# Altium footprint library Aquarium_ATO_V1_0.PcbLib: 21 footprints (part 2 of 2)
Each footprint in its own frame and in the unit in brackets; x right, y up, seen from the top. Pads: shape width x height; smd on the part's side, far side on the other; paste and mask are expansions set on the pad; w line width, h text height; cw(c..) or ccw(c..) is an arc to the next point about the centre after c.
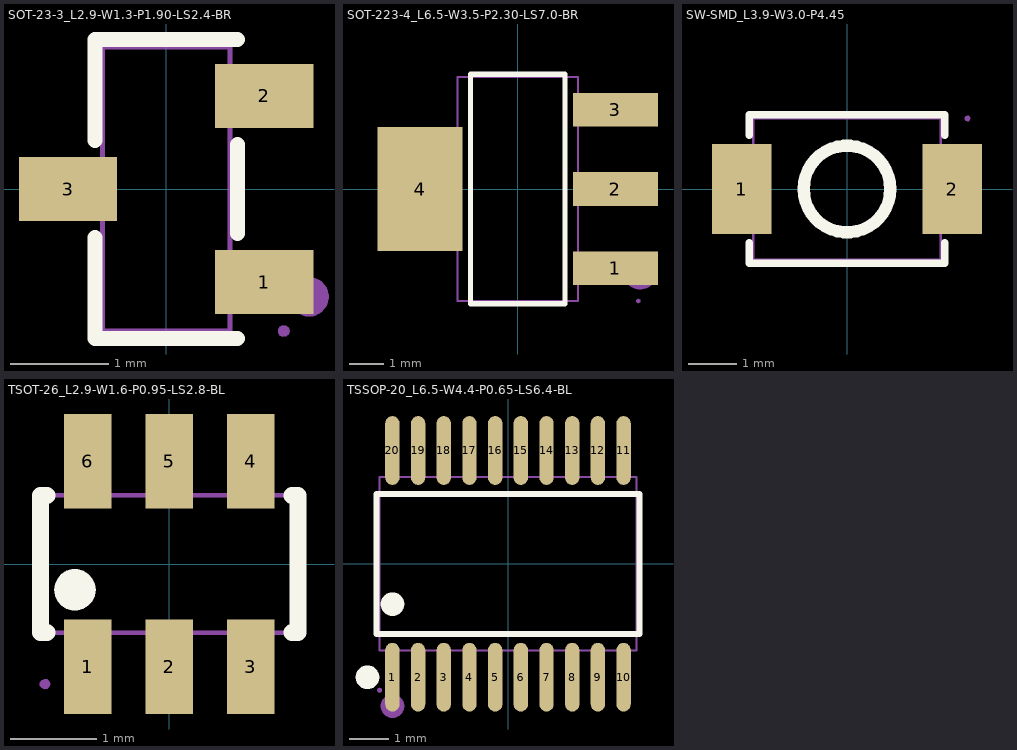
[diagram p1: the footprints below, top view; thin cyan lines are the x and y axes]

## SOT-23-3_L2.9-W1.3-P1.90-LS2.4-BR [mil]
pads (3):
  rect 39.4x25.6 smd: 1(39.4,-37.4) 2(39.4,37.4) 3(-39.4,0)
Top Overlay:
  lines w6: -28.6,-19.5 -28.6,-60.1 28.6,-60.1 ; -28.6,19.5 -28.6,60.1 28.6,60.1 ; 28.6,-17.9 28.6,17.9
Mechanical 6:
  lines w7.9: 53.5,-43.3 53.9,-41.6 55,-40.2 56.6,-39.5 58.4,-39.5 59.9,-40.2 61,-41.6 61.4,-43.3 61,-45 59.9,-46.4 58.4,-47.2 56.6,-47.2 55,-46.4 53.9,-45 53.5,-43.3
Mechanical 7:
  lines w2: -25.6,-57.1 25.6,-57.1 25.6,57.1 -25.6,57.1 -25.6,-57.1
Mechanical 8:
  region: 49.6,-57.1 49.2,-58.4 48.2,-59.2 46.9,-59.4 45.7,-58.9 45,-57.8 45,-56.4 45.7,-55.3 46.9,-54.8 48.2,-54.9 49.2,-55.8
Mechanical 9:
  region: -47.2,-8.5 -47.2,8.5 -35.4,8.5 -35.4,-8.5
  region: 35.4,-45.9 35.4,-28.9 47.2,-28.9 47.2,-45.9
  region: 35.4,28.9 35.4,45.9 47.2,45.9 47.2,28.9
Mechanical 10:
  region: -35.8,-8.5 -35.8,8.5 -25.2,8.5 -25.2,-8.5
  region: 25.2,-45.9 25.2,-28.9 35.8,-28.9 35.8,-45.9
  region: 25.2,28.9 25.2,45.9 35.8,45.9 35.8,28.9

## SOT-223-4_L6.5-W3.5-P2.30-LS7.0-BR [mil]
pads (4):
  rect 97.2x38.6 smd: 1(111.6,-90.6) 2(111.6,0) 3(111.6,90.6)
  rect 97.2x141.7 smd: 4(-111.6,0)
Top Overlay:
  lines w6: -54,-131 54,-131 54,131 -54,131 -54,-131
Mechanical 6:
  lines w19.7: 130.2,-96.3 130.2,-93.7 131,-91.1 132.4,-88.8 134.3,-87 136.7,-85.7 139.3,-85.2 142,-85.4 144.5,-86.3 146.7,-87.8 148.4,-89.9 149.5,-92.3 149.8,-95 149.5,-97.7 148.4,-100.1 146.7,-102.2 144.5,-103.7 142,-104.6 139.3,-104.8 136.7,-104.3 134.3,-103 132.4,-101.2 131,-98.9 130.2,-96.3
Mechanical 7:
  lines w2: -68.9,-128 68.9,-128 68.9,128 -68.9,128 -68.9,-128
Mechanical 8:
  region: 140.2,-127.9 139.8,-129.2 138.8,-130.1 137.5,-130.3 136.3,-129.7 135.5,-128.6 135.5,-127.3 136.3,-126.2 137.5,-125.6 138.8,-125.8 139.8,-126.7
Mechanical 9:
  region: -100.4,-59.1 -100.4,59.1 -137.8,59.1 -137.8,-59.1
  region: 100.4,76.8 100.4,104.3 137.8,104.3 137.8,76.8
  region: 100.4,-13.8 100.4,13.8 137.8,13.8 137.8,-13.8
  region: 100.4,-104.3 100.4,-76.8 137.8,-76.8 137.8,-104.3
Mechanical 10:
  region: -100.8,-59.1 -100.8,59.1 -68.5,59.1 -68.5,-59.1
  region: 68.5,76.8 68.5,104.3 100.8,104.3 100.8,76.8
  region: 68.5,-13.8 68.5,13.8 100.8,13.8 100.8,-13.8
  region: 68.5,-104.3 68.5,-76.8 100.8,-76.8 100.8,-104.3

## SW-SMD_L3.9-W3.0-P4.45 [mil]
pads (2):
  rect 48.4x73.2 smd: 1(-86,0) 2(86,0)
Top Overlay:
  lines w6: -79.8,-43.7 -79.8,-60.7 79.8,-60.7 79.8,-43.7 ; -79.8,43.7 -79.8,60.7 79.8,60.7 79.8,43.7
  lines w10: -35.4,0 -35,5.3 -33.9,10.4 -31.9,15.4 -29.3,20 -26,24.1 -22.1,27.7 -17.7,30.7 -12.9,33 -7.9,34.5 -2.6,35.3 2.6,35.3 7.9,34.5 12.9,33 17.7,30.7 22.1,27.7 26,24.1 29.3,20 31.9,15.4 33.9,10.4 35,5.3 35.4,0 35,-5.3 33.9,-10.4 31.9,-15.4 29.3,-20 26,-24.1 22.1,-27.7 17.7,-30.7 12.9,-33 7.9,-34.5 2.6,-35.3 -2.6,-35.3 -7.9,-34.5 -12.9,-33 -17.7,-30.7 -22.1,-27.7 -26,-24.1 -29.3,-20 -31.9,-15.4 -33.9,-10.4 -35,-5.3 -35.4,0
Mechanical 7:
  lines w2: -76.8,-57.7 -76.8,57.7 76.8,57.7 76.8,-57.7 -76.8,-57.7
Mechanical 8:
  region: 100.8,57.7 100.4,56.4 99.4,55.5 98.1,55.3 96.9,55.9 96.2,57 96.2,58.3 96.9,59.5 98.1,60 99.4,59.8 100.4,59
Mechanical 9:
  region: -98.4,25.6 -98.4,-25.6 -63,-25.6 -63,25.6
  region: 98.4,25.6 98.4,-25.6 63,-25.6 63,25.6

## TSOT-26_L2.9-W1.6-P0.95-LS2.8-BL [mil]
pads (6):
  rect 21.7x43.3 smd paste+0 mask+2: 1(-37.4,-47.2) 2(0,-47.2) 3(37.4,-47.2) 4(37.4,47.2) 5(0,47.2) 6(-37.4,47.2)
Top Overlay:
  region: -52.8,-11.8 -52.4,-9.1 -51.3,-6.7 -49.5,-4.6 -47.3,-3.2 -44.7,-2.4 -42,-2.4 -39.4,-3.2 -37.1,-4.6 -35.3,-6.7 -34.2,-9.1 -33.8,-11.8 -34.2,-14.5 -35.3,-17 -37.1,-19 -39.4,-20.5 -42,-21.2 -44.7,-21.2 -47.3,-20.5 -49.5,-19 -51.3,-17 -52.4,-14.5
  lines w7.9: -56.3,-31.5 -59.1,-31.5 -59.1,-22.5 -59.1,22.5 -59.1,31.5 -56.3,31.5 ; 56.3,-31.5 59.1,-31.5 59.1,-22.5 59.1,22.5 59.1,31.5 56.3,31.5
Mechanical 6:
  lines w7.9: -43.3,-55.1 -42.9,-53.4 -41.8,-52 -40.2,-51.3 -38.5,-51.3 -36.9,-52 -35.8,-53.4 -35.4,-55.1 -35.8,-56.8 -36.9,-58.2 -38.5,-59 -40.2,-59 -41.8,-58.2 -42.9,-56.8 -43.3,-55.1
Mechanical 7:
  lines w2: -57.1,-31.5 57.1,-31.5 57.1,31.5 -57.1,31.5 -57.1,-31.5
Mechanical 8:
  region: -54.7,-55.1 -55.1,-56.4 -56.1,-57.3 -57.4,-57.5 -58.6,-56.9 -59.4,-55.8 -59.4,-54.5 -58.6,-53.3 -57.4,-52.8 -56.1,-53 -55.1,-53.8
Mechanical 9:
  region: -46.1,39.4 -46.1,55.1 -28.7,55.1 -28.7,39.4
  region: -8.7,39.4 -8.7,55.1 8.7,55.1 8.7,39.4
  region: 28.7,39.4 28.7,55.1 46.1,55.1 46.1,39.4
  region: 28.7,-55.1 28.7,-39.4 46.1,-39.4 46.1,-55.1
  region: -8.7,-55.1 -8.7,-39.4 8.7,-39.4 8.7,-55.1
  region: -46.1,-55.1 -46.1,-39.4 -28.7,-39.4 -28.7,-55.1
Mechanical 10:
  region: -46.1,31.1 -46.1,39.8 -28.7,39.8 -28.7,31.1
  region: -8.7,31.1 -8.7,39.8 8.7,39.8 8.7,31.1
  region: 28.7,31.1 28.7,39.8 46.1,39.8 46.1,31.1
  region: 28.7,-39.8 28.7,-31.1 46.1,-31.1 46.1,-39.8
  region: -8.7,-39.8 -8.7,-31.1 8.7,-31.1 8.7,-39.8
  region: -46.1,-39.8 -46.1,-31.1 -28.7,-31.1 -28.7,-39.8

## TSSOP-20_L6.5-W4.4-P0.65-LS6.4-BL [mil]
pads (20):
  oval 14.3x68.6 smd: 1(-115.2,-113) 2(-89.6,-113) 3(-64,-113) 4(-38.4,-113) 5(-12.8,-113) 6(12.8,-113) 7(38.4,-113) 8(64,-113) 9(89.6,-113) 10(115.2,-113) 11(115.2,113) 12(89.6,113) 13(64,113) 14(38.4,113) 15(12.8,113) 16(-12.8,113) 17(-38.4,113) 18(-64,113) 19(-89.6,113) 20(-115.2,113)
Top Overlay:
  lines w6: -131,-69.7 131,-69.7 131,69.7 -131,69.7 -131,-69.7
  lines w11.8: -146,-113 -145.7,-111 -144.7,-109.2 -143.1,-107.9 -141.2,-107.2 -139.1,-107.2 -137.2,-107.9 -135.6,-109.2 -134.6,-111 -134.2,-113 -134.6,-115.1 -135.6,-116.8 -137.2,-118.1 -139.1,-118.9 -141.2,-118.9 -143.1,-118.1 -144.7,-116.8 -145.7,-115.1 -146,-113 ; -121.1,-40.1 -120.7,-38.1 -119.7,-36.3 -118.1,-35 -116.2,-34.3 -114.1,-34.3 -112.2,-35 -110.6,-36.3 -109.6,-38.1 -109.3,-40.1 -109.6,-42.1 -110.6,-43.9 -112.2,-45.2 -114.1,-45.9 -116.2,-45.9 -118.1,-45.2 -119.7,-43.9 -120.7,-42.1 -121.1,-40.1
Mechanical 6:
  lines w11.8: -121.1,-141.7 -120.7,-139.7 -119.7,-137.9 -118.1,-136.6 -116.2,-135.9 -114.1,-135.9 -112.2,-136.6 -110.6,-137.9 -109.6,-139.7 -109.3,-141.7 -109.6,-143.8 -110.6,-145.5 -112.2,-146.8 -114.1,-147.6 -116.2,-147.6 -118.1,-146.8 -119.7,-145.5 -120.7,-143.8 -121.1,-141.7
Mechanical 7:
  lines w2: -128,-86.6 128,-86.6 128,86.6 -128,86.6 -128,-86.6
Mechanical 8:
  region: -125.6,-126 -126,-127.3 -127,-128.1 -128.3,-128.3 -129.5,-127.8 -130.2,-126.6 -130.2,-125.3 -129.5,-124.2 -128.3,-123.6 -127,-123.8 -126,-124.7
Mechanical 9:
  region: 110,126 110,102.4 120.3,102.4 120.3,126
  region: 84.4,126 84.4,102.4 94.7,102.4 94.7,126
  region: 58.9,126 58.9,102.4 69.1,102.4 69.1,126
  region: 33.3,126 33.3,102.4 43.5,102.4 43.5,126
  region: 7.7,126 7.7,102.4 17.9,102.4 17.9,126
  region: -17.9,126 -17.9,102.4 -7.7,102.4 -7.7,126
  region: -43.5,126 -43.5,102.4 -33.3,102.4 -33.3,126
  region: -69.1,126 -69.1,102.4 -58.9,102.4 -58.9,126
  region: -94.7,126 -94.7,102.4 -84.4,102.4 -84.4,126
  region: -120.3,126 -120.3,102.4 -110,102.4 -110,126
  region: 110,-126 110,-102.4 120.3,-102.4 120.3,-126
  region: 84.4,-126 84.4,-102.4 94.7,-102.4 94.7,-126
  region: 58.9,-126 58.9,-102.4 69.1,-102.4 69.1,-126
  region: 33.3,-126 33.3,-102.4 43.5,-102.4 43.5,-126
  region: 7.7,-126 7.7,-102.4 17.9,-102.4 17.9,-126
  region: -17.9,-126 -17.9,-102.4 -7.7,-102.4 -7.7,-126
  region: -43.5,-126 -43.5,-102.4 -33.3,-102.4 -33.3,-126
  region: -69.1,-126 -69.1,-102.4 -58.9,-102.4 -58.9,-126
  region: -94.7,-126 -94.7,-102.4 -84.4,-102.4 -84.4,-126
  region: -120.3,-126 -120.3,-102.4 -110,-102.4 -110,-126
Mechanical 10:
  region: 110,102.8 110,86.2 120.3,86.2 120.3,102.8
  region: 84.4,102.8 84.4,86.2 94.7,86.2 94.7,102.8
  region: 58.9,102.8 58.9,86.2 69.1,86.2 69.1,102.8
  region: 33.3,102.8 33.3,86.2 43.5,86.2 43.5,102.8
  region: 7.7,102.8 7.7,86.2 17.9,86.2 17.9,102.8
  region: -17.9,102.8 -17.9,86.2 -7.7,86.2 -7.7,102.8
  region: -43.5,102.8 -43.5,86.2 -33.3,86.2 -33.3,102.8
  region: -69.1,102.8 -69.1,86.2 -58.9,86.2 -58.9,102.8
  region: -94.7,102.8 -94.7,86.2 -84.4,86.2 -84.4,102.8
  region: -120.3,102.8 -120.3,86.2 -110,86.2 -110,102.8
  region: 110,-102.8 110,-86.2 120.3,-86.2 120.3,-102.8
  region: 84.4,-102.8 84.4,-86.2 94.7,-86.2 94.7,-102.8
  region: 58.9,-102.8 58.9,-86.2 69.1,-86.2 69.1,-102.8
  region: 33.3,-102.8 33.3,-86.2 43.5,-86.2 43.5,-102.8
  region: 7.7,-102.8 7.7,-86.2 17.9,-86.2 17.9,-102.8
  region: -17.9,-102.8 -17.9,-86.2 -7.7,-86.2 -7.7,-102.8
  region: -43.5,-102.8 -43.5,-86.2 -33.3,-86.2 -33.3,-102.8
  region: -69.1,-102.8 -69.1,-86.2 -58.9,-86.2 -58.9,-102.8
  region: -94.7,-102.8 -94.7,-86.2 -84.4,-86.2 -84.4,-102.8
  region: -120.3,-102.8 -120.3,-86.2 -110,-86.2 -110,-102.8